# Altium footprint library FootPrintLib_9.PcbLib: 287 footprints (part 16 of 18)
Each footprint in its own frame and in the unit in brackets; x right, y up, seen from the top. Pads: shape width x height; smd on the part's side, far side on the other; paste and mask are expansions set on the pad; w line width, h text height; cw(c..) or ccw(c..) is an arc to the next point about the centre after c.
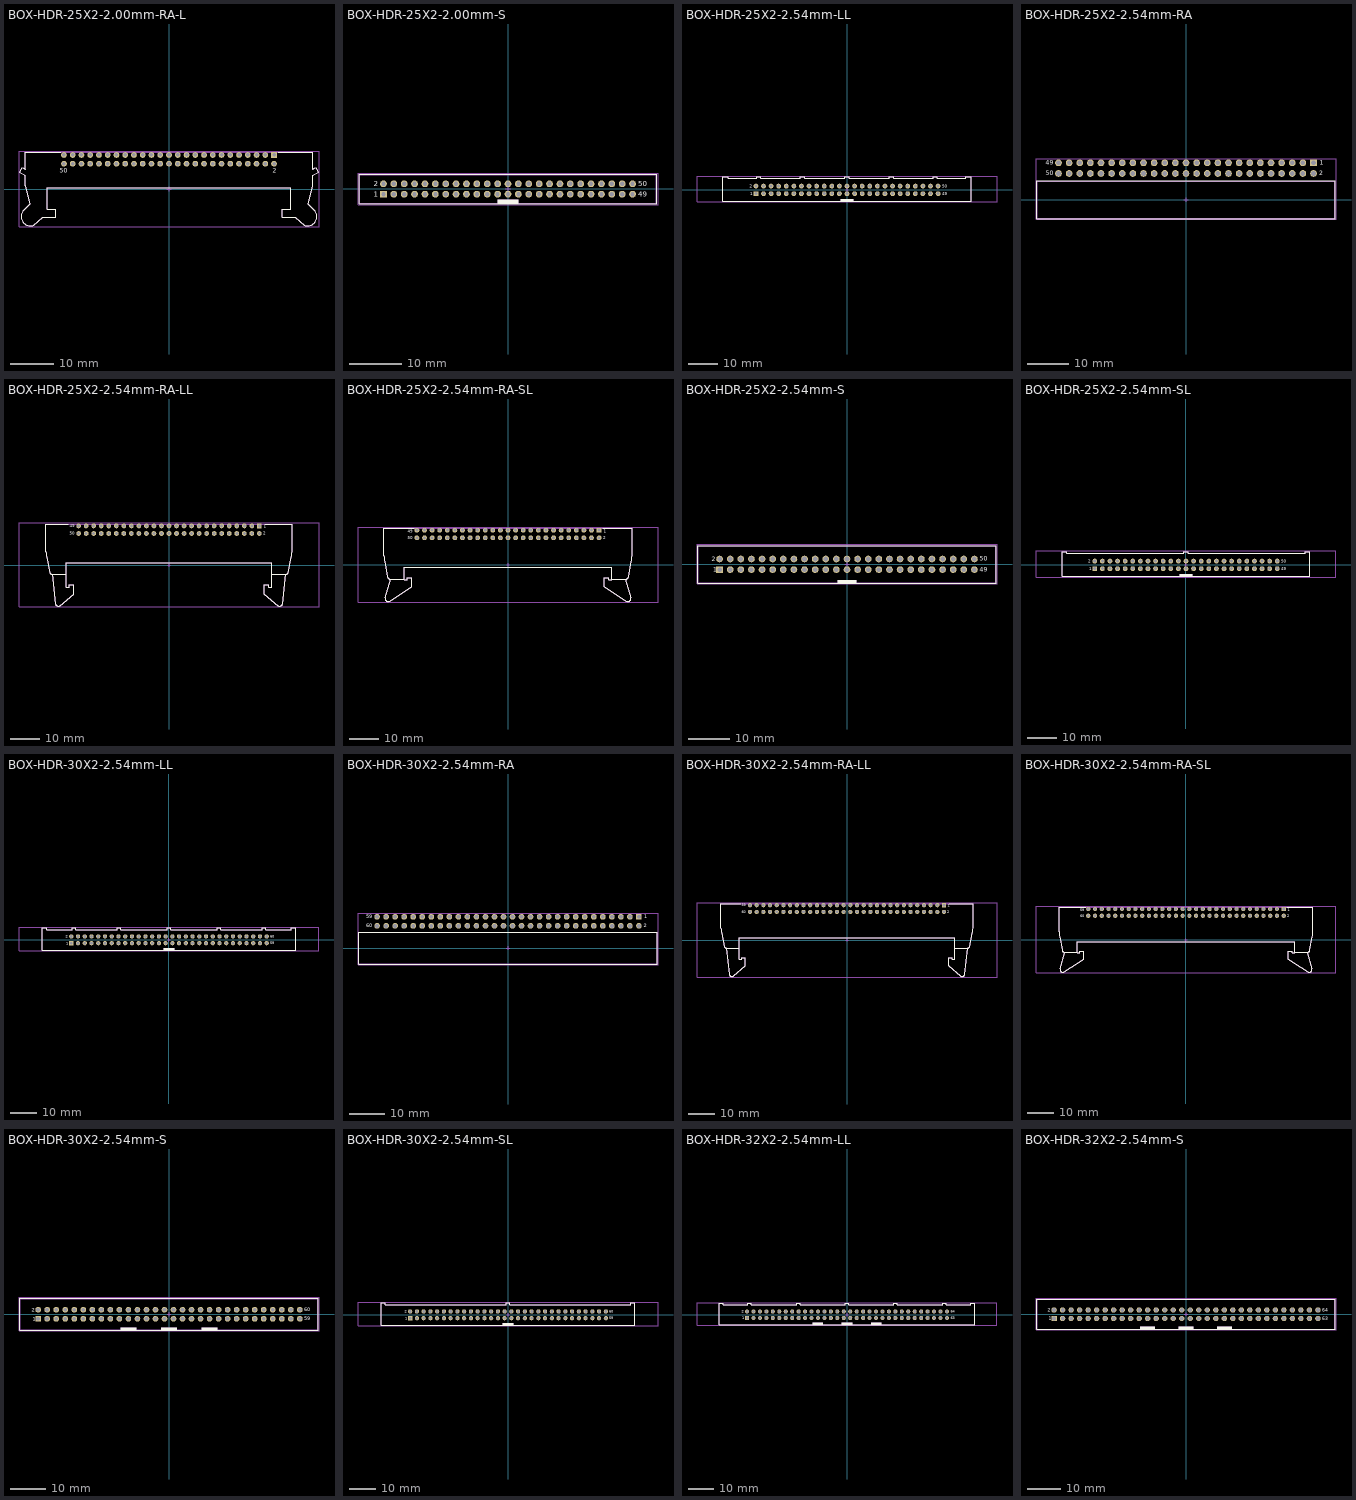
[diagram p15: the footprints below, top view; thin cyan lines are the x and y axes]

## BOX-HDR-25X2-2.00mm-RA-L [mm] "2.00mm Male Angled Box Header with Lever, 50p"
height 3.15
pads (50):
  rect 1.3x1.3 hole 0.8: 1(24,7.775)
  round 1.3 hole 0.8: 2(24,5.775) 3(22,7.775) 4(22,5.775) 5(20,7.775) 6(20,5.775) 7(18,7.775) 8(18,5.775) 9(16,7.775) 10(16,5.775) 11(14,7.775) 12(14,5.775) 13(12,7.775) 14(12,5.775) 15(10,7.775) 16(10,5.775) 17(8,7.775) 18(8,5.775) 19(6,7.775) 20(6,5.775) 21(4,7.775) 22(4,5.775) 23(2,7.775) 24(2,5.775) 25(0,7.775) 26(0,5.775) 27(-2,7.775) 28(-2,5.775) 29(-4,7.775) 30(-4,5.775) 31(-6,7.775) 32(-6,5.775) 33(-8,7.775) 34(-8,5.775) 35(-10,7.775) 36(-10,5.775) 37(-12,7.775) 38(-12,5.775) 39(-14,7.775) 40(-14,5.775) 41(-16,7.775) 42(-16,5.775) 43(-18,7.775) 44(-18,5.775) 45(-20,7.775) 46(-20,5.775) 47(-22,7.775) 48(-22,5.775) 49(-24,7.775) 50(-24,5.775)
Top Overlay:
  lines w0.2: -33.466,4.813 -34.06,3.785 -32.851,3.087 -32.851,0.753 ; -33.46,4.815 -32.848,4.462 ; -32.894,-4.611 ccw(c-31.68,-6.325) -30.865,-8.26 ; -32.892,-4.613 -31.85,-3.535 -32.837,0.738 ; -32.85,4.464 -32.85,8.425 -24.75,8.425 ; -30.866,-8.259 -28.85,-6.475 -25.85,-6.475 -25.85,-4.675 -27.85,-4.675 -27.85,0.325 27.85,0.325 27.85,-4.675 25.85,-4.675 25.85,-6.475 28.85,-6.475 30.866,-8.259 ; 24.95,8.425 32.85,8.425 32.85,4.464 ; 30.865,-8.26 ccw(c31.68,-6.325) 32.894,-4.611 ; 32.837,0.738 31.85,-3.535 32.892,-4.613 ; 32.848,4.462 33.46,4.815 ; 32.851,0.753 32.851,3.087 34.06,3.785 33.466,4.813
  text "50" at -25,3.675 h1.02
  text "2" at 23.7,3.675 h1.02
Mechanical 13:
  lines w0.1: -33.466,4.813 -34.06,3.785 -32.851,3.087 -32.851,0.753 ; -33.46,4.815 -32.848,4.462 ; -32.894,-4.611 ccw(c-31.68,-6.325) -30.865,-8.26 ; -32.892,-4.613 -31.85,-3.535 -32.837,0.738 ; -32.85,4.464 -32.85,8.425 32.85,8.425 ; -30.866,-8.259 -28.85,-6.475 -25.85,-6.475 -25.85,-4.675 -27.85,-4.675 -27.85,0.325 27.85,0.325 27.85,-4.675 25.85,-4.675 25.85,-6.475 28.85,-6.475 30.866,-8.259 ; 30.865,-8.26 ccw(c31.68,-6.325) 32.894,-4.611 ; 32.837,0.738 31.85,-3.535 32.892,-4.613 ; 32.848,4.462 33.46,4.815 ; 32.848,8.423 32.85,8.425 ; 32.85,4.464 32.85,8.425 ; 32.851,0.753 32.851,3.087 34.06,3.785 33.466,4.813
Mechanical 15:
  lines w0.05: -0.5,0 0.5,0 ; 0,-0.5 0,0.5 ; -34.262,-8.625 34.262,-8.625 34.262,8.625 -34.262,8.625 -34.262,-8.625
3D body "62505022121.stp": height 6.1, standoff -3.05, extent -34.062,-8.425 34.062,8.425

## BOX-HDR-25X2-2.00mm-S [mm] "2.00mm Male Box Header, 50p"
height 5.6
pads (50):
  rect 1.3x1.3 hole 0.8: 1(-24,-1)
  round 1.3 hole 0.8: 2(-24,1) 3(-22,-1) 4(-22,1) 5(-20,-1) 6(-20,1) 7(-18,-1) 8(-18,1) 9(-16,-1) 10(-16,1) 11(-14,-1) 12(-14,1) 13(-12,-1) 14(-12,1) 15(-10,-1) 16(-10,1) 17(-8,-1) 18(-8,1) 19(-6,-1) 20(-6,1) 21(-4,-1) 22(-4,1) 23(-2,-1) 24(-2,1) 25(0,-1) 26(0,1) 27(2,-1) 28(2,1) 29(4,-1) 30(4,1) 31(6,-1) 32(6,1) 33(8,-1) 34(8,1) 35(10,-1) 36(10,1) 37(12,-1) 38(12,1) 39(14,-1) 40(14,1) 41(16,-1) 42(16,1) 43(18,-1) 44(18,1) 45(20,-1) 46(20,1) 47(22,-1) 48(22,1) 49(24,-1) 50(24,1)
Top Overlay:
  rectangle: -2,-2.85 2,-2.05
  lines w0.2: -28.7,-2.85 -28.7,2.85 28.7,2.85 28.7,-2.85 -28.7,-2.85
  text "2" at -25.9,0.5 h1.02
  text "1" at -25.9,-1.5 h1.02
  text "49" at 25.1,-1.5 h1.02
  text "50" at 25.1,0.5 h1.02
Mechanical 13:
  rectangle: -2,-2.75 2,-2.05
  lines w0.1: -28.6,-2.75 28.6,-2.75 28.6,2.75 -28.6,2.75 -28.6,-2.75
Mechanical 15:
  lines w0.05: -0.5,0 0.5,0 ; 0,-0.5 0,0.5 ; -28.9,-3.05 28.9,-3.05 28.9,3.05 -28.9,3.05 -28.9,-3.05
3D body "62505021621.stp": height 5.65, standoff -2.45, extent -28.6,-2.75 28.6,2.75

## BOX-HDR-25X2-2.54mm-LL [mm] "50 pins, straight, long lever, gold plating"
height 28
pads (50):
  rect 1.6x1.6 hole 1.02: 1(-30.48,-1.27)
  round 1.6 hole 1.02: 2(-30.48,1.27) 3(-27.94,-1.27) 4(-27.94,1.27) 5(-25.4,-1.27) 6(-25.4,1.27) 7(-22.86,-1.27) 8(-22.86,1.27) 9(-20.32,-1.27) 10(-20.32,1.27) 11(-17.78,-1.27) 12(-17.78,1.27) 13(-15.24,-1.27) 14(-15.24,1.27) 15(-12.7,-1.27) 16(-12.7,1.27) 17(-10.16,-1.27) 18(-10.16,1.27) 19(-7.62,-1.27) 20(-7.62,1.27) 21(-5.08,-1.27) 22(-5.08,1.27) 23(-2.54,-1.27) 24(-2.54,1.27) 25(0,-1.27) 26(0,1.27) 27(2.54,-1.27) 28(2.54,1.27) 29(5.08,-1.27) 30(5.08,1.27) 31(7.62,-1.27) 32(7.62,1.27) 33(10.16,-1.27) 34(10.16,1.27) 35(12.7,-1.27) 36(12.7,1.27) 37(15.24,-1.27) 38(15.24,1.27) 39(17.78,-1.27) 40(17.78,1.27) 41(20.32,-1.27) 42(20.32,1.27) 43(22.86,-1.27) 44(22.86,1.27) 45(25.4,-1.27) 46(25.4,1.27) 47(27.94,-1.27) 48(27.94,1.27) 49(30.48,-1.27) 50(30.48,1.27)
Top Overlay:
  rectangle: -2.1,-3.85 2.1,-3.04
  lines w0.2: -41.5,-3.85 41.5,-3.85 41.5,4.45 39.77,4.45 39.77,3.85 30.2,3.85 30.2,4.45 28.8,4.45 28.8,3.85 15.6,3.85 15.6,4.45 14.2,4.45 14.2,3.85 0.7,3.85 0.7,4.45 -0.7,4.45 -0.7,3.85 -14.2,3.85 -14.2,4.45 -15.6,4.45 -15.6,3.85 -28.8,3.85 -28.8,4.45 -30.2,4.45 -30.2,3.85 -39.77,3.85 -39.77,4.45 -41.5,4.45 -41.5,-3.85
  text "49" at 31.9,-1.74 h1.02
  text "50" at 31.9,0.8 h1.02
  text "2" at -32.5,0.8 h1.02
  text "1" at -32.3,-1.8 h1.02
Mechanical 13:
  rectangle: -2.1,-3.85 2.1,-3.04
  lines w0.1: -41.5,-3.85 -41.5,4.45 -39.77,4.45 -39.77,3.85 -30.2,3.85 -30.2,4.45 -28.8,4.45 -28.8,3.85 -15.6,3.85 -15.6,4.45 -14.2,4.45 -14.2,3.85 -0.7,3.85 -0.7,4.45 0.7,4.45 0.7,3.85 14.2,3.85 14.2,4.45 15.6,4.45 15.6,3.85 28.8,3.85 28.8,4.45 30.2,4.45 30.2,3.85 39.77,3.85 39.77,4.45 41.5,4.45 41.5,-3.85 -41.5,-3.85
Mechanical 15:
  lines w0.05: -0.5,0 0.5,0 ; 0,-0.5 0,0.5 ; -50.2,-4.05 -50.2,4.65 50.2,4.65 50.2,-4.05 -50.2,-4.05
3D body "61205022821 (rev1).stp": height 27.84, standoff -3.35, extent -41.5,-3.86 41.5,4.45

## BOX-HDR-25X2-2.54mm-RA [mm] "50 pins, right angled, gold plating"
height 9.1
pads (50):
  rect 1.6x1.6 hole 1.1: 1(30.48,8.805)
  round 1.6 hole 1.1: 2(30.48,6.265) 3(27.94,8.805) 4(27.94,6.265) 5(25.4,8.805) 6(25.4,6.265) 7(22.86,8.805) 8(22.86,6.265) 9(20.32,8.805) 10(20.32,6.265) 11(17.78,8.805) 12(17.78,6.265) 13(15.24,8.805) 14(15.24,6.265) 15(12.7,8.805) 16(12.7,6.265) 17(10.16,8.805) 18(10.16,6.265) 19(7.62,8.805) 20(7.62,6.265) 21(5.08,8.805) 22(5.08,6.265) 23(2.54,8.805) 24(2.54,6.265) 25(0,8.805) 26(0,6.265) 27(-2.54,8.805) 28(-2.54,6.265) 29(-5.08,8.805) 30(-5.08,6.265) 31(-7.62,8.805) 32(-7.62,6.265) 33(-10.16,8.805) 34(-10.16,6.265) 35(-12.7,8.805) 36(-12.7,6.265) 37(-15.24,8.805) 38(-15.24,6.265) 39(-17.78,8.805) 40(-17.78,6.265) 41(-20.32,8.805) 42(-20.32,6.265) 43(-22.86,8.805) 44(-22.86,6.265) 45(-25.4,8.805) 46(-25.4,6.265) 47(-27.94,8.805) 48(-27.94,6.265) 49(-30.48,8.805) 50(-30.48,6.265)
Top Overlay:
  lines w0.2: -35.655,-4.5 35.655,-4.5 35.655,4.5 -35.655,4.5 -35.655,-4.5
  text "50" at -33.55,5.8 h1.02
  text "49" at -33.55,8.34 h1.02
  text "1" at 31.94,8.34 h1.02
  text "2" at 31.84,5.8 h1.02
Mechanical 13:
  lines w0.1: -35.58,-4.425 35.58,-4.425 35.58,4.425 -35.58,4.425 -35.58,-4.425
Mechanical 15:
  lines w0.05: -0.5,0 0.5,0 ; 0,-0.5 0,0.5 ; -35.855,-4.7 -35.855,9.805 35.855,9.805 35.855,-4.7 -35.855,-4.7
3D body "61205021721.stp": height 9.23, standoff -2.88, extent -35.58,-4.425 35.58,9.125

## BOX-HDR-25X2-2.54mm-RA-LL [mm] "50 pins, right angeled, long lever, gold plating"
height 10.8
pads (50):
  rect 1.6x1.6 hole 1.02: 1(30.48,13.23)
  round 1.6 hole 1.02: 2(30.48,10.69) 3(27.94,13.23) 4(27.94,10.69) 5(25.4,13.23) 6(25.4,10.69) 7(22.86,13.23) 8(22.86,10.69) 9(20.32,13.23) 10(20.32,10.69) 11(17.78,13.23) 12(17.78,10.69) 13(15.24,13.23) 14(15.24,10.69) 15(12.7,13.23) 16(12.7,10.69) 17(10.16,13.23) 18(10.16,10.69) 19(7.62,13.23) 20(7.62,10.69) 21(5.08,13.23) 22(5.08,10.69) 23(2.54,13.23) 24(2.54,10.69) 25(0,13.23) 26(0,10.69) 27(-2.54,13.23) 28(-2.54,10.69) 29(-5.08,13.23) 30(-5.08,10.69) 31(-7.62,13.23) 32(-7.62,10.69) 33(-10.16,13.23) 34(-10.16,10.69) 35(-12.7,13.23) 36(-12.7,10.69) 37(-15.24,13.23) 38(-15.24,10.69) 39(-17.78,13.23) 40(-17.78,10.69) 41(-20.32,13.23) 42(-20.32,10.69) 43(-22.86,13.23) 44(-22.86,10.69) 45(-25.4,13.23) 46(-25.4,10.69) 47(-27.94,13.23) 48(-27.94,10.69) 49(-30.48,13.23) 50(-30.48,10.69)
Top Overlay:
  lines w0.2: -41.5,4.54 -41.5,13.85 -34.05,13.85 ; -41.495,4.54 ccw(c-31.5,4.84) -41.254,2.636 -40.209,-2.534 ; -40.203,-2.533 ccw(c-39.28,-2.15) -39.28,-3.15 -34.6,-3.15 ; -39.464,-3.15 -38.318,-13.022 ccw(c-37.33,-12.87) -36.672,-13.623 -32.201,-9.758 ; -32.2,-9.76 -32.2,-6.66 -33.7,-6.66 -33.7,-7.37 -34.6,-7.37 -34.6,0.85 34.6,0.85 34.6,-7.37 33.7,-7.37 33.7,-6.66 32.2,-6.66 32.2,-9.76 ; 32.201,-9.758 36.673,-13.623 ccw(c37.33,-12.87) 38.318,-13.022 39.464,-3.15 ; 32.45,13.85 41.5,13.85 41.5,4.54 ; 34.6,-3.15 39.28,-3.15 ccw(c39.28,-2.15) 40.204,-2.533 ; 40.209,-2.534 41.254,2.636 ccw(c31.5,4.84) 41.496,4.54
  text "1" at 31.9,12.66 h1.02
  text "2" at 31.8,10.26 h1.02
  text "50" at -33.55,10.26 h1.02
  text "49" at -33.55,12.8 h1.02
Mechanical 13:
  lines w0.1: -41.5,4.54 -41.5,13.85 41.5,13.85 41.5,4.54 ; -41.495,4.54 ccw(c-31.5,4.84) -41.254,2.636 -40.209,-2.534 ; -40.203,-2.533 ccw(c-39.28,-2.15) -39.28,-3.15 -34.6,-3.15 ; -39.464,-3.15 -38.318,-13.022 ccw(c-37.33,-12.87) -36.672,-13.623 -32.201,-9.758 ; -32.2,-9.76 -32.2,-6.66 -33.7,-6.66 -33.7,-7.37 -34.6,-7.37 -34.6,0.85 34.6,0.85 34.6,-7.37 33.7,-7.37 33.7,-6.66 32.2,-6.66 32.2,-9.76 ; 32.201,-9.758 36.673,-13.623 ccw(c37.33,-12.87) 38.318,-13.022 39.464,-3.15 ; 34.6,-3.15 39.28,-3.15 ccw(c39.28,-2.15) 40.204,-2.533 ; 40.209,-2.534 41.254,2.636 ccw(c31.5,4.84) 41.496,4.54
Mechanical 15:
  lines w0.05: -0.5,0 0.5,0 ; 0,-0.5 0,0.5 ; -50.6,-14.06 -50.6,14.23 50.6,14.23 50.6,-14.06 -50.6,-14.06
3D body "61205022921 (rev1).stp": height 8.35, standoff -2.35, extent -41.5,-13.871 41.5,13.85

## BOX-HDR-25X2-2.54mm-RA-SL [mm] "50 pins, right angeled, short lever, gold plating"
height 8.3
pads (50):
  rect 1.6x1.6 hole 1.02: 1(30.48,11.63)
  round 1.6 hole 1.02: 2(30.48,9.09) 3(27.94,11.63) 4(27.94,9.09) 5(25.4,11.63) 6(25.4,9.09) 7(22.86,11.63) 8(22.86,9.09) 9(20.32,11.63) 10(20.32,9.09) 11(17.78,11.63) 12(17.78,9.09) 13(15.24,11.63) 14(15.24,9.09) 15(12.7,11.63) 16(12.7,9.09) 17(10.16,11.63) 18(10.16,9.09) 19(7.62,11.63) 20(7.62,9.09) 21(5.08,11.63) 22(5.08,9.09) 23(2.54,11.63) 24(2.54,9.09) 25(0,11.63) 26(0,9.09) 27(-2.54,11.63) 28(-2.54,9.09) 29(-5.08,11.63) 30(-5.08,9.09) 31(-7.62,11.63) 32(-7.62,9.09) 33(-10.16,11.63) 34(-10.16,9.09) 35(-12.7,11.63) 36(-12.7,9.09) 37(-15.24,11.63) 38(-15.24,9.09) 39(-17.78,11.63) 40(-17.78,9.09) 41(-20.32,11.63) 42(-20.32,9.09) 43(-22.86,11.63) 44(-22.86,9.09) 45(-25.4,11.63) 46(-25.4,9.09) 47(-27.94,11.63) 48(-27.94,9.09) 49(-30.48,11.63) 50(-30.48,9.09)
Top Overlay:
  lines w0.2: -40.364,-3.751 -41.306,1.138 cw(c-31.5,3.1) -41.5,3.1 -41.5,12.25 -31.4,12.25 ; -40.36,-3.75 ccw(c-39.36,-3.75) -39.36,-4.75 ; -39.455,-4.75 -34.7,-4.75 ; -39.274,-4.851 -41.107,-10.941 ccw(c-40.15,-11.23) -39.6,-12.066 -32.2,-7.33 -32.2,-4.23 -33.7,-4.23 -33.7,-4.94 -34.7,-4.94 -34.7,-0.75 34.7,-0.75 34.7,-4.94 33.7,-4.94 33.7,-4.23 32.2,-4.23 32.2,-7.33 39.6,-12.067 ccw(c40.15,-11.23) 41.107,-10.941 39.274,-4.851 ; 31.65,12.25 41.5,12.25 41.5,3.1 cw(c31.5,3.1) 41.306,1.138 40.364,-3.751 ; 34.7,-4.75 39.455,-4.75 ; 39.36,-4.75 ccw(c39.36,-3.75) 40.36,-3.75
  text "49" at -33.55,10.8 h1.02
  text "50" at -33.55,8.6 h1.02
  text "1" at 32,10.8 h1.02
  text "2" at 31.9,8.6 h1.02
Mechanical 13:
  lines w0.1: -40.364,-3.751 -41.306,1.138 cw(c-31.5,3.1) -41.5,3.1 -41.5,12.25 41.5,12.25 41.5,3.1 cw(c31.5,3.1) 41.306,1.138 40.364,-3.751 ; -40.36,-3.75 ccw(c-39.36,-3.75) -39.36,-4.75 ; -39.455,-4.75 -34.7,-4.75 ; -39.274,-4.851 -41.107,-10.941 ccw(c-40.15,-11.23) -39.6,-12.066 -32.2,-7.33 -32.2,-4.23 -33.7,-4.23 -33.7,-4.94 -34.7,-4.94 -34.7,-0.75 34.7,-0.75 34.7,-4.94 33.7,-4.94 33.7,-4.23 32.2,-4.23 32.2,-7.33 39.6,-12.067 ccw(c40.15,-11.23) 41.107,-10.941 39.274,-4.851 ; 34.7,-4.75 39.455,-4.75 ; 39.36,-4.75 ccw(c39.36,-3.75) 40.36,-3.75
Mechanical 15:
  lines w0.05: -0.5,0 0.5,0 ; 0,-0.5 0,0.5 ; -50.2,-12.45 -50.2,12.63 50.2,12.63 50.2,-12.45 -50.2,-12.45
3D body "61205022121.stp": height 8.35, standoff -3.35, extent -41.5,-12.25 41.5,12.25

## BOX-HDR-25X2-2.54mm-S [mm] "50 pins, straight, gold plating"
height 9.1
pads (50):
  rect 1.6x1.6 hole 1.1: 1(-30.48,-1.27)
  round 1.6 hole 1.1: 2(-30.48,1.27) 3(-27.94,-1.27) 4(-27.94,1.27) 5(-25.4,-1.27) 6(-25.4,1.27) 7(-22.86,-1.27) 8(-22.86,1.27) 9(-20.32,-1.27) 10(-20.32,1.27) 11(-17.78,-1.27) 12(-17.78,1.27) 13(-15.24,-1.27) 14(-15.24,1.27) 15(-12.7,-1.27) 16(-12.7,1.27) 17(-10.16,-1.27) 18(-10.16,1.27) 19(-7.62,-1.27) 20(-7.62,1.27) 21(-5.08,-1.27) 22(-5.08,1.27) 23(-2.54,-1.27) 24(-2.54,1.27) 25(0,-1.27) 26(0,1.27) 27(2.54,-1.27) 28(2.54,1.27) 29(5.08,-1.27) 30(5.08,1.27) 31(7.62,-1.27) 32(7.62,1.27) 33(10.16,-1.27) 34(10.16,1.27) 35(12.7,-1.27) 36(12.7,1.27) 37(15.24,-1.27) 38(15.24,1.27) 39(17.78,-1.27) 40(17.78,1.27) 41(20.32,-1.27) 42(20.32,1.27) 43(22.86,-1.27) 44(22.86,1.27) 45(25.4,-1.27) 46(25.4,1.27) 47(27.94,-1.27) 48(27.94,1.27) 49(30.48,-1.27) 50(30.48,1.27)
Top Overlay:
  rectangle: -2.25,-4.5 2.25,-3.7
  lines w0.2: -35.68,-4.5 -35.68,4.5 35.68,4.5 35.68,-4.5 -35.68,-4.5
  text "49" at 31.74,-1.74 h1.02
  text "50" at 31.74,0.8 h1.02
  text "2" at -32.34,0.74 h1.02
  text "1" at -32.04,-1.8 h1.02
Mechanical 13:
  rectangle: -2.25,-4.425 2.25,-3.7
  lines w0.1: -35.58,-4.425 35.58,-4.425 35.58,4.425 -35.58,4.425 -35.58,-4.425
Mechanical 15:
  lines w0.05: -0.5,0 0.5,0 ; 0,-0.5 0,0.5 ; -35.88,-4.7 -35.88,4.85 35.88,4.85 35.88,-4.7 -35.88,-4.7
3D body "61205021621.stp": height 9.13, standoff -2.98, extent -35.58,-4.425 35.58,4.75

## BOX-HDR-25X2-2.54mm-SL [mm] "50 pins, straight, short lever, gold plating"
height 24.5
pads (50):
  rect 1.6x1.6 hole 1.02: 1(-30.48,-1.27)
  round 1.6 hole 1.02: 2(-30.48,1.27) 3(-27.94,-1.27) 4(-27.94,1.27) 5(-25.4,-1.27) 6(-25.4,1.27) 7(-22.86,-1.27) 8(-22.86,1.27) 9(-20.32,-1.27) 10(-20.32,1.27) 11(-17.78,-1.27) 12(-17.78,1.27) 13(-15.24,-1.27) 14(-15.24,1.27) 15(-12.7,-1.27) 16(-12.7,1.27) 17(-10.16,-1.27) 18(-10.16,1.27) 19(-7.62,-1.27) 20(-7.62,1.27) 21(-5.08,-1.27) 22(-5.08,1.27) 23(-2.54,-1.27) 24(-2.54,1.27) 25(0,-1.27) 26(0,1.27) 27(2.54,-1.27) 28(2.54,1.27) 29(5.08,-1.27) 30(5.08,1.27) 31(7.62,-1.27) 32(7.62,1.27) 33(10.16,-1.27) 34(10.16,1.27) 35(12.7,-1.27) 36(12.7,1.27) 37(15.24,-1.27) 38(15.24,1.27) 39(17.78,-1.27) 40(17.78,1.27) 41(20.32,-1.27) 42(20.32,1.27) 43(22.86,-1.27) 44(22.86,1.27) 45(25.4,-1.27) 46(25.4,1.27) 47(27.94,-1.27) 48(27.94,1.27) 49(30.48,-1.27) 50(30.48,1.27)
Top Overlay:
  rectangle: -2.1,-3.85 2.1,-3.05
  lines w0.2: -0.7,4.45 -0.7,3.85 -39.85,3.85 -39.85,4.45 -41.4,4.45 -41.4,-3.85 41.4,-3.85 41.4,4.45 39.85,4.45 39.85,3.85 0.7,3.85 0.7,4.45 -0.7,4.45 ; -0.7,4.45 -0.7,4.45
  text "1" at -32.3,-1.8 h1.02
  text "2" at -32.6,0.8 h1.02
  text "49" at 31.8,-1.74 h1.02
  text "50" at 31.8,0.8 h1.02
Mechanical 13:
  rectangle: -2.1,-3.85 2.1,-3.05
  lines w0.1: -0.7,4.45 0.7,4.45 0.7,3.85 39.85,3.85 39.85,4.45 41.4,4.45 41.4,-3.85 -41.4,-3.85 -41.4,4.45 -39.85,4.45 -39.85,3.85 -0.7,3.85 -0.7,4.45 ; -0.7,4.45 -0.7,4.45
Mechanical 15:
  lines w0.05: -0.5,0 0.5,0 ; 0,-0.5 0,0.5 ; -50.1,-4.05 50.1,-4.05 50.1,4.65 -50.1,4.65 -50.1,-4.05
3D body "61205022021.stp": height 24.55, standoff -3.35, extent -41.5,-3.85 41.5,4.45

## BOX-HDR-30X2-2.54mm-LL [mm] "60 pins, straight, long lever, gold plating"
height 28
pads (60):
  rect 1.6x1.6 hole 1.02: 1(-36.83,-1.27)
  round 1.6 hole 1.02: 2(-36.83,1.27) 3(-34.29,-1.27) 4(-34.29,1.27) 5(-31.75,-1.27) 6(-31.75,1.27) 7(-29.21,-1.27) 8(-29.21,1.27) 9(-26.67,-1.27) 10(-26.67,1.27) 11(-24.13,-1.27) 12(-24.13,1.27) 13(-21.59,-1.27) 14(-21.59,1.27) 15(-19.05,-1.27) 16(-19.05,1.27) 17(-16.51,-1.27) 18(-16.51,1.27) 19(-13.97,-1.27) 20(-13.97,1.27) 21(-11.43,-1.27) 22(-11.43,1.27) 23(-8.89,-1.27) 24(-8.89,1.27) 25(-6.35,-1.27) 26(-6.35,1.27) 27(-3.81,-1.27) 28(-3.81,1.27) 29(-1.27,-1.27) 30(-1.27,1.27) 31(1.27,-1.27) 32(1.27,1.27) 33(3.81,-1.27) 34(3.81,1.27) 35(6.35,-1.27) 36(6.35,1.27) 37(8.89,-1.27) 38(8.89,1.27) 39(11.43,-1.27) 40(11.43,1.27) 41(13.97,-1.27) 42(13.97,1.27) 43(16.51,-1.27) 44(16.51,1.27) 45(19.05,-1.27) 46(19.05,1.27) 47(21.59,-1.27) 48(21.59,1.27) 49(24.13,-1.27) 50(24.13,1.27) 51(26.67,-1.27) 52(26.67,1.27) 53(29.21,-1.27) 54(29.21,1.27) 55(31.75,-1.27) 56(31.75,1.27) 57(34.29,-1.27) 58(34.29,1.27) 59(36.83,-1.27) 60(36.83,1.27)
Top Overlay:
  rectangle: -2.1,-3.85 2.1,-3.04
  lines w0.2: -47.85,-3.85 47.85,-3.85 47.85,4.45 46.12,4.45 46.12,3.85 36.55,3.85 36.55,4.45 35.15,4.45 35.15,3.85 19.5,3.85 19.5,4.45 18.1,4.45 18.1,3.85 0.7,3.85 0.7,4.45 -0.7,4.45 -0.7,3.85 -18.1,3.85 -18.1,4.45 -19.5,4.45 -19.5,3.85 -35.15,3.85 -35.15,4.45 -36.55,4.45 -36.55,3.85 -46.12,3.85 -46.12,4.45 -47.85,4.45 -47.85,-3.85
  text "2" at -38.85,0.8 h1.02
  text "1" at -38.65,-1.8 h1.02
  text "60" at 38.25,0.8 h1.02
  text "59" at 38.25,-1.74 h1.02
Mechanical 13:
  rectangle: -2.1,-3.85 2.1,-3.04
  lines w0.1: -47.85,-3.85 -47.85,4.45 -46.12,4.45 -46.12,3.85 -36.55,3.85 -36.55,4.45 -35.15,4.45 -35.15,3.85 -19.5,3.85 -19.5,4.45 -18.1,4.45 -18.1,3.85 -0.7,3.85 -0.7,4.45 0.7,4.45 0.7,3.85 18.1,3.85 18.1,4.45 19.5,4.45 19.5,3.85 35.15,3.85 35.15,4.45 36.55,4.45 36.55,3.85 46.12,3.85 46.12,4.45 47.85,4.45 47.85,-3.85 -47.85,-3.85
Mechanical 15:
  lines w0.05: -0.5,0 0.5,0 ; 0,-0.5 0,0.5 ; -56.55,-4.05 -56.55,4.65 56.55,4.65 56.55,-4.05 -56.55,-4.05
3D body "61206022821 (rev1).stp": height 27.84, standoff -3.35, extent -47.85,-3.86 47.85,4.45

## BOX-HDR-30X2-2.54mm-RA [mm] "60 pins, right angled, gold plating"
height 9.1
pads (60):
  rect 1.6x1.6 hole 1.1: 1(36.83,8.805)
  round 1.6 hole 1.1: 2(36.83,6.265) 3(34.29,8.805) 4(34.29,6.265) 5(31.75,8.805) 6(31.75,6.265) 7(29.21,8.805) 8(29.21,6.265) 9(26.67,8.805) 10(26.67,6.265) 11(24.13,8.805) 12(24.13,6.265) 13(21.59,8.805) 14(21.59,6.265) 15(19.05,8.805) 16(19.05,6.265) 17(16.51,8.805) 18(16.51,6.265) 19(13.97,8.805) 20(13.97,6.265) 21(11.43,8.805) 22(11.43,6.265) 23(8.89,8.805) 24(8.89,6.265) 25(6.35,8.805) 26(6.35,6.265) 27(3.81,8.805) 28(3.81,6.265) 29(1.27,8.805) 30(1.27,6.265) 31(-1.27,8.805) 32(-1.27,6.265) 33(-3.81,8.805) 34(-3.81,6.265) 35(-6.35,8.805) 36(-6.35,6.265) 37(-8.89,8.805) 38(-8.89,6.265) 39(-11.43,8.805) 40(-11.43,6.265) 41(-13.97,8.805) 42(-13.97,6.265) 43(-16.51,8.805) 44(-16.51,6.265) 45(-19.05,8.805) 46(-19.05,6.265) 47(-21.59,8.805) 48(-21.59,6.265) 49(-24.13,8.805) 50(-24.13,6.265) 51(-26.67,8.805) 52(-26.67,6.265) 53(-29.21,8.805) 54(-29.21,6.265) 55(-31.75,8.805) 56(-31.75,6.265) 57(-34.29,8.805) 58(-34.29,6.265) 59(-36.83,8.805) 60(-36.83,6.265)
Top Overlay:
  lines w0.2: -42.005,-4.5 42.005,-4.5 42.005,4.5 -42.005,4.5 -42.005,-4.5
  text "1" at 38.29,8.34 h1.02
  text "2" at 38.19,5.8 h1.02
  text "59" at -39.9,8.34 h1.02
  text "60" at -39.9,5.8 h1.02
Mechanical 13:
  lines w0.1: -41.93,-4.425 41.93,-4.425 41.93,4.425 -41.93,4.425 -41.93,-4.425
Mechanical 15:
  lines w0.05: -0.5,0 0.5,0 ; 0,-0.5 0,0.5 ; -42.205,-4.7 -42.205,9.805 42.205,9.805 42.205,-4.7 -42.205,-4.7
3D body "61206021721.stp": height 9.23, standoff -2.88, extent -41.93,-4.425 41.93,9.125

## BOX-HDR-30X2-2.54mm-RA-LL [mm] "60 pins, right angeled, long lever, gold plating"
height 10.8
pads (60):
  rect 1.6x1.6 hole 1.02: 1(36.83,13.23)
  round 1.6 hole 1.02: 2(36.83,10.69) 3(34.29,13.23) 4(34.29,10.69) 5(31.75,13.23) 6(31.75,10.69) 7(29.21,13.23) 8(29.21,10.69) 9(26.67,13.23) 10(26.67,10.69) 11(24.13,13.23) 12(24.13,10.69) 13(21.59,13.23) 14(21.59,10.69) 15(19.05,13.23) 16(19.05,10.69) 17(16.51,13.23) 18(16.51,10.69) 19(13.97,13.23) 20(13.97,10.69) 21(11.43,13.23) 22(11.43,10.69) 23(8.89,13.23) 24(8.89,10.69) 25(6.35,13.23) 26(6.35,10.69) 27(3.81,13.23) 28(3.81,10.69) 29(1.27,13.23) 30(1.27,10.69) 31(-1.27,13.23) 32(-1.27,10.69) 33(-3.81,13.23) 34(-3.81,10.69) 35(-6.35,13.23) 36(-6.35,10.69) 37(-8.89,13.23) 38(-8.89,10.69) 39(-11.43,13.23) 40(-11.43,10.69) 41(-13.97,13.23) 42(-13.97,10.69) 43(-16.51,13.23) 44(-16.51,10.69) 45(-19.05,13.23) 46(-19.05,10.69) 47(-21.59,13.23) 48(-21.59,10.69) 49(-24.13,13.23) 50(-24.13,10.69) 51(-26.67,13.23) 52(-26.67,10.69) 53(-29.21,13.23) 54(-29.21,10.69) 55(-31.75,13.23) 56(-31.75,10.69) 57(-34.29,13.23) 58(-34.29,10.69) 59(-36.83,13.23) 60(-36.83,10.69)
Top Overlay:
  lines w0.2: -47.85,4.54 -47.85,13.85 -40.4,13.85 ; -47.845,4.54 ccw(c-37.85,4.84) -47.604,2.636 -46.559,-2.534 ; -46.553,-2.533 ccw(c-45.63,-2.15) -45.63,-3.15 -40.95,-3.15 ; -45.814,-3.15 -44.668,-13.022 ccw(c-43.68,-12.87) -43.022,-13.623 -38.551,-9.758 ; -38.55,-9.76 -38.55,-6.66 -40.05,-6.66 -40.05,-7.37 -40.95,-7.37 -40.95,0.85 40.95,0.85 40.95,-7.37 40.05,-7.37 40.05,-6.66 38.55,-6.66 38.55,-9.76 ; 38.551,-9.758 43.023,-13.623 ccw(c43.68,-12.87) 44.668,-13.022 45.814,-3.15 ; 38.8,13.85 47.85,13.85 47.85,4.54 ; 40.95,-3.15 45.63,-3.15 ccw(c45.63,-2.15) 46.554,-2.533 ; 46.559,-2.534 47.604,2.636 ccw(c37.85,4.84) 47.846,4.54
  text "60" at -39.9,10.26 h1.02
  text "59" at -39.9,12.8 h1.02
  text "2" at 38.15,10.26 h1.02
  text "1" at 38.25,12.66 h1.02
Mechanical 13:
  lines w0.1: -47.85,4.54 -47.85,13.85 47.85,13.85 47.85,4.54 ; -47.845,4.54 ccw(c-37.85,4.84) -47.604,2.636 -46.559,-2.534 ; -46.553,-2.533 ccw(c-45.63,-2.15) -45.63,-3.15 -40.95,-3.15 ; -45.814,-3.15 -44.668,-13.022 ccw(c-43.68,-12.87) -43.022,-13.623 -38.551,-9.758 ; -38.55,-9.76 -38.55,-6.66 -40.05,-6.66 -40.05,-7.37 -40.95,-7.37 -40.95,0.85 40.95,0.85 40.95,-7.37 40.05,-7.37 40.05,-6.66 38.55,-6.66 38.55,-9.76 ; 38.551,-9.758 43.023,-13.623 ccw(c43.68,-12.87) 44.668,-13.022 45.814,-3.15 ; 40.95,-3.15 45.63,-3.15 ccw(c45.63,-2.15) 46.554,-2.533 ; 46.559,-2.534 47.604,2.636 ccw(c37.85,4.84) 47.846,4.54
Mechanical 15:
  lines w0.05: -0.5,0 0.5,0 ; 0,-0.5 0,0.5 ; -56.95,-14.06 56.95,-14.06 56.95,14.23 -56.95,14.23 -56.95,-14.06
3D body "61206022921 (rev1).stp": height 8.35, standoff -2.35, extent -47.85,-13.871 47.85,13.85

## BOX-HDR-30X2-2.54mm-RA-SL [mm] "60 pins, right angeled, short lever, gold plating"
height 8.3
pads (60):
  rect 1.6x1.6 hole 1.02: 1(36.83,11.63)
  round 1.6 hole 1.02: 2(36.83,9.09) 3(34.29,11.63) 4(34.29,9.09) 5(31.75,11.63) 6(31.75,9.09) 7(29.21,11.63) 8(29.21,9.09) 9(26.67,11.63) 10(26.67,9.09) 11(24.13,11.63) 12(24.13,9.09) 13(21.59,11.63) 14(21.59,9.09) 15(19.05,11.63) 16(19.05,9.09) 17(16.51,11.63) 18(16.51,9.09) 19(13.97,11.63) 20(13.97,9.09) 21(11.43,11.63) 22(11.43,9.09) 23(8.89,11.63) 24(8.89,9.09) 25(6.35,11.63) 26(6.35,9.09) 27(3.81,11.63) 28(3.81,9.09) 29(1.27,11.63) 30(1.27,9.09) 31(-1.27,11.63) 32(-1.27,9.09) 33(-3.81,11.63) 34(-3.81,9.09) 35(-6.35,11.63) 36(-6.35,9.09) 37(-8.89,11.63) 38(-8.89,9.09) 39(-11.43,11.63) 40(-11.43,9.09) 41(-13.97,11.63) 42(-13.97,9.09) 43(-16.51,11.63) 44(-16.51,9.09) 45(-19.05,11.63) 46(-19.05,9.09) 47(-21.59,11.63) 48(-21.59,9.09) 49(-24.13,11.63) 50(-24.13,9.09) 51(-26.67,11.63) 52(-26.67,9.09) 53(-29.21,11.63) 54(-29.21,9.09) 55(-31.75,11.63) 56(-31.75,9.09) 57(-34.29,11.63) 58(-34.29,9.09) 59(-36.83,11.63) 60(-36.83,9.09)
Top Overlay:
  lines w0.2: -46.714,-3.751 -47.656,1.138 cw(c-37.85,3.1) -47.85,3.1 -47.85,12.25 -37.75,12.25 ; -46.71,-3.75 ccw(c-45.71,-3.75) -45.71,-4.75 ; -45.805,-4.75 -41.05,-4.75 ; -45.624,-4.851 -47.457,-10.941 ccw(c-46.5,-11.23) -45.95,-12.066 -38.55,-7.33 -38.55,-4.23 -40.05,-4.23 -40.05,-4.94 -41.05,-4.94 -41.05,-0.75 41.05,-0.75 41.05,-4.94 40.05,-4.94 40.05,-4.23 38.55,-4.23 38.55,-7.33 45.95,-12.067 ccw(c46.5,-11.23) 47.457,-10.941 45.624,-4.851 ; 38,12.25 47.85,12.25 47.85,3.1 cw(c37.85,3.1) 47.656,1.138 46.714,-3.751 ; 41.05,-4.75 45.805,-4.75 ; 45.71,-4.75 ccw(c45.71,-3.75) 46.71,-3.75
  text "2" at 38.25,8.6 h1.02
  text "1" at 38.35,10.8 h1.02
  text "59" at -39.9,10.8 h1.02
  text "60" at -39.9,8.6 h1.02
Mechanical 13:
  lines w0.1: -46.714,-3.751 -47.656,1.138 cw(c-37.85,3.1) -47.85,3.1 -47.85,12.25 47.85,12.25 47.85,3.1 cw(c37.85,3.1) 47.656,1.138 46.714,-3.751 ; -46.71,-3.75 ccw(c-45.71,-3.75) -45.71,-4.75 ; -45.805,-4.75 -41.05,-4.75 ; -45.624,-4.851 -47.457,-10.941 ccw(c-46.5,-11.23) -45.95,-12.066 -38.55,-7.33 -38.55,-4.23 -40.05,-4.23 -40.05,-4.94 -41.05,-4.94 -41.05,-0.75 41.05,-0.75 41.05,-4.94 40.05,-4.94 40.05,-4.23 38.55,-4.23 38.55,-7.33 45.95,-12.067 ccw(c46.5,-11.23) 47.457,-10.941 45.624,-4.851 ; 41.05,-4.75 45.805,-4.75 ; 45.71,-4.75 ccw(c45.71,-3.75) 46.71,-3.75
Mechanical 15:
  lines w0.05: -0.5,0 0.5,0 ; 0,-0.5 0,0.5 ; -56.55,-12.45 56.55,-12.45 56.55,12.63 -56.55,12.63 -56.55,-12.45
3D body "61206022121.stp": height 8.35, standoff -3.35, extent -47.85,-12.25 47.85,12.25

## BOX-HDR-30X2-2.54mm-S [mm] "60 pins, straight, gold plating"
height 9.1
pads (60):
  rect 1.6x1.6 hole 1.1: 1(-36.83,-1.27)
  round 1.6 hole 1.1: 2(-36.83,1.27) 3(-34.29,-1.27) 4(-34.29,1.27) 5(-31.75,-1.27) 6(-31.75,1.27) 7(-29.21,-1.27) 8(-29.21,1.27) 9(-26.67,-1.27) 10(-26.67,1.27) 11(-24.13,-1.27) 12(-24.13,1.27) 13(-21.59,-1.27) 14(-21.59,1.27) 15(-19.05,-1.27) 16(-19.05,1.27) 17(-16.51,-1.27) 18(-16.51,1.27) 19(-13.97,-1.27) 20(-13.97,1.27) 21(-11.43,-1.27) 22(-11.43,1.27) 23(-8.89,-1.27) 24(-8.89,1.27) 25(-6.35,-1.27) 26(-6.35,1.27) 27(-3.81,-1.27) 28(-3.81,1.27) 29(-1.27,-1.27) 30(-1.27,1.27) 31(1.27,-1.27) 32(1.27,1.27) 33(3.81,-1.27) 34(3.81,1.27) 35(6.35,-1.27) 36(6.35,1.27) 37(8.89,-1.27) 38(8.89,1.27) 39(11.43,-1.27) 40(11.43,1.27) 41(13.97,-1.27) 42(13.97,1.27) 43(16.51,-1.27) 44(16.51,1.27) 45(19.05,-1.27) 46(19.05,1.27) 47(21.59,-1.27) 48(21.59,1.27) 49(24.13,-1.27) 50(24.13,1.27) 51(26.67,-1.27) 52(26.67,1.27) 53(29.21,-1.27) 54(29.21,1.27) 55(31.75,-1.27) 56(31.75,1.27) 57(34.29,-1.27) 58(34.29,1.27) 59(36.83,-1.27) 60(36.83,1.27)
Top Overlay:
  rectangle: 9.18,-4.5 13.68,-3.7
  rectangle: -13.68,-4.5 -9.18,-3.7
  rectangle: -2.25,-4.5 2.25,-3.7
  lines w0.2: -42.03,-4.5 42.03,-4.5 42.03,4.5 -42.03,4.5 -42.03,-4.5
  text "59" at 38.09,-1.74 h1.02
  text "60" at 38.09,0.8 h1.02
  text "1" at -38.39,-1.8 h1.02
  text "2" at -38.69,0.74 h1.02
Mechanical 13:
  rectangle: 9.18,-4.425 13.68,-3.7
  rectangle: -13.68,-4.425 -9.18,-3.7
  rectangle: -2.25,-4.425 2.25,-3.7
  lines w0.1: -41.93,-4.425 -41.93,4.425 41.93,4.425 41.93,-4.425 -41.93,-4.425
Mechanical 15:
  lines w0.05: -0.5,0 0.5,0 ; 0,-0.5 0,0.5 ; -42.23,-4.7 42.23,-4.7 42.23,4.85 -42.23,4.85 -42.23,-4.7
3D body "61206021621.stp": height 9.13, standoff -2.98, extent -41.93,-4.425 41.93,4.75

## BOX-HDR-30X2-2.54mm-SL [mm] "60 pins, straight, short lever, gold plating"
height 24.5
pads (60):
  rect 1.6x1.6 hole 1.02: 1(-36.83,-1.27)
  round 1.6 hole 1.02: 2(-36.83,1.27) 3(-34.29,-1.27) 4(-34.29,1.27) 5(-31.75,-1.27) 6(-31.75,1.27) 7(-29.21,-1.27) 8(-29.21,1.27) 9(-26.67,-1.27) 10(-26.67,1.27) 11(-24.13,-1.27) 12(-24.13,1.27) 13(-21.59,-1.27) 14(-21.59,1.27) 15(-19.05,-1.27) 16(-19.05,1.27) 17(-16.51,-1.27) 18(-16.51,1.27) 19(-13.97,-1.27) 20(-13.97,1.27) 21(-11.43,-1.27) 22(-11.43,1.27) 23(-8.89,-1.27) 24(-8.89,1.27) 25(-6.35,-1.27) 26(-6.35,1.27) 27(-3.81,-1.27) 28(-3.81,1.27) 29(-1.27,-1.27) 30(-1.27,1.27) 31(1.27,-1.27) 32(1.27,1.27) 33(3.81,-1.27) 34(3.81,1.27) 35(6.35,-1.27) 36(6.35,1.27) 37(8.89,-1.27) 38(8.89,1.27) 39(11.43,-1.27) 40(11.43,1.27) 41(13.97,-1.27) 42(13.97,1.27) 43(16.51,-1.27) 44(16.51,1.27) 45(19.05,-1.27) 46(19.05,1.27) 47(21.59,-1.27) 48(21.59,1.27) 49(24.13,-1.27) 50(24.13,1.27) 51(26.67,-1.27) 52(26.67,1.27) 53(29.21,-1.27) 54(29.21,1.27) 55(31.75,-1.27) 56(31.75,1.27) 57(34.29,-1.27) 58(34.29,1.27) 59(36.83,-1.27) 60(36.83,1.27)
Top Overlay:
  rectangle: -2.1,-3.85 2.1,-3.05
  lines w0.2: -0.7,4.45 0.7,4.45 0.7,3.85 46.2,3.85 46.2,4.45 47.75,4.45 47.75,-3.85 -47.75,-3.85 -47.75,4.45 -46.2,4.45 -46.2,3.85 -0.7,3.85 -0.7,4.45 ; -0.7,4.45 -0.7,4.45
  text "2" at -38.95,0.8 h1.02
  text "1" at -38.65,-1.8 h1.02
  text "59" at 38.15,-1.74 h1.02
  text "60" at 38.15,0.8 h1.02
Mechanical 13:
  rectangle: -2.1,-3.85 2.1,-3.05
  lines w0.1: -0.7,4.45 -0.7,3.85 -46.2,3.85 -46.2,4.45 -47.75,4.45 -47.75,-3.85 47.75,-3.85 47.75,4.45 46.2,4.45 46.2,3.85 0.7,3.85 0.7,4.45 -0.7,4.45 ; -0.7,4.45 -0.7,4.45
Mechanical 15:
  lines w0.05: -0.5,0 0.5,0 ; 0,-0.5 0,0.5 ; -56.45,-4.05 -56.45,4.65 56.45,4.65 56.45,-4.05 -56.45,-4.05
3D body "61206022021.stp": height 24.55, standoff -3.35, extent -47.849,-3.85 47.851,4.45

## BOX-HDR-32X2-2.54mm-LL [mm] "64 pins, straight, long lever, gold plating"
height 28
pads (64):
  rect 1.6x1.6 hole 1.02: 1(-39.37,-1.27)
  round 1.6 hole 1.02: 2(-39.37,1.27) 3(-36.83,-1.27) 4(-36.83,1.27) 5(-34.29,-1.27) 6(-34.29,1.27) 7(-31.75,-1.27) 8(-31.75,1.27) 9(-29.21,-1.27) 10(-29.21,1.27) 11(-26.67,-1.27) 12(-26.67,1.27) 13(-24.13,-1.27) 14(-24.13,1.27) 15(-21.59,-1.27) 16(-21.59,1.27) 17(-19.05,-1.27) 18(-19.05,1.27) 19(-16.51,-1.27) 20(-16.51,1.27) 21(-13.97,-1.27) 22(-13.97,1.27) 23(-11.43,-1.27) 24(-11.43,1.27) 25(-8.89,-1.27) 26(-8.89,1.27) 27(-6.35,-1.27) 28(-6.35,1.27) 29(-3.81,-1.27) 30(-3.81,1.27) 31(-1.27,-1.27) 32(-1.27,1.27) 33(1.27,-1.27) 34(1.27,1.27) 35(3.81,-1.27) 36(3.81,1.27) 37(6.35,-1.27) 38(6.35,1.27) 39(8.89,-1.27) 40(8.89,1.27) 41(11.43,-1.27) 42(11.43,1.27) 43(13.97,-1.27) 44(13.97,1.27) 45(16.51,-1.27) 46(16.51,1.27) 47(19.05,-1.27) 48(19.05,1.27) 49(21.59,-1.27) 50(21.59,1.27) 51(24.13,-1.27) 52(24.13,1.27) 53(26.67,-1.27) 54(26.67,1.27) 55(29.21,-1.27) 56(29.21,1.27) 57(31.75,-1.27) 58(31.75,1.27) 59(34.29,-1.27) 60(34.29,1.27) 61(36.83,-1.27) 62(36.83,1.27) 63(39.37,-1.27) 64(39.37,1.27)
Top Overlay:
  rectangle: -2.1,-3.85 2.1,-3.04
  rectangle: -13.56,-3.85 -9.36,-3.04
  rectangle: 9.36,-3.85 13.56,-3.04
  lines w0.2: -50.39,-3.85 50.39,-3.85 50.39,4.45 48.66,4.45 48.66,3.85 39.09,3.85 39.09,4.45 37.69,4.45 37.69,3.85 19.8,3.85 19.8,4.45 18.4,4.45 18.4,3.85 0.7,3.85 0.7,4.45 -0.7,4.45 -0.7,3.85 -18.4,3.85 -18.4,4.45 -19.8,4.45 -19.8,3.85 -37.69,3.85 -37.69,4.45 -39.09,4.45 -39.09,3.85 -48.66,3.85 -48.66,4.45 -50.39,4.45 -50.39,-3.85
  text "63" at 40.79,-1.74 h1.02
  text "64" at 40.79,0.8 h1.02
  text "2" at -41.39,0.8 h1.02
  text "1" at -41.19,-1.8 h1.02
Mechanical 13:
  rectangle: 9.36,-3.85 13.56,-3.04
  rectangle: -13.56,-3.85 -9.36,-3.04
  rectangle: -2.1,-3.85 2.1,-3.04
  lines w0.1: -50.39,-3.85 -50.39,4.45 -48.66,4.45 -48.66,3.85 -39.09,3.85 -39.09,4.45 -37.69,4.45 -37.69,3.85 -19.8,3.85 -19.8,4.45 -18.4,4.45 -18.4,3.85 -0.7,3.85 -0.7,4.45 0.7,4.45 0.7,3.85 18.4,3.85 18.4,4.45 19.8,4.45 19.8,3.85 37.69,3.85 37.69,4.45 39.09,4.45 39.09,3.85 48.66,3.85 48.66,4.45 50.39,4.45 50.39,-3.85 -50.39,-3.85
Mechanical 15:
  lines w0.05: -0.5,0 0.5,0 ; 0,-0.5 0,0.5 ; -59.09,-4.05 -59.09,4.65 59.09,4.65 59.09,-4.05 -59.09,-4.05
3D body "61206422821 (rev1).stp": height 27.84, standoff -3.35, extent -50.39,-3.86 50.39,4.45

## BOX-HDR-32X2-2.54mm-S [mm] "64 pins, straight, gold plating"
height 9.1
pads (64):
  rect 1.6x1.6 hole 1.1: 1(-39.37,-1.27)
  round 1.6 hole 1.1: 2(-39.37,1.27) 3(-36.83,-1.27) 4(-36.83,1.27) 5(-34.29,-1.27) 6(-34.29,1.27) 7(-31.75,-1.27) 8(-31.75,1.27) 9(-29.21,-1.27) 10(-29.21,1.27) 11(-26.67,-1.27) 12(-26.67,1.27) 13(-24.13,-1.27) 14(-24.13,1.27) 15(-21.59,-1.27) 16(-21.59,1.27) 17(-19.05,-1.27) 18(-19.05,1.27) 19(-16.51,-1.27) 20(-16.51,1.27) 21(-13.97,-1.27) 22(-13.97,1.27) 23(-11.43,-1.27) 24(-11.43,1.27) 25(-8.89,-1.27) 26(-8.89,1.27) 27(-6.35,-1.27) 28(-6.35,1.27) 29(-3.81,-1.27) 30(-3.81,1.27) 31(-1.27,-1.27) 32(-1.27,1.27) 33(1.27,-1.27) 34(1.27,1.27) 35(3.81,-1.27) 36(3.81,1.27) 37(6.35,-1.27) 38(6.35,1.27) 39(8.89,-1.27) 40(8.89,1.27) 41(11.43,-1.27) 42(11.43,1.27) 43(13.97,-1.27) 44(13.97,1.27) 45(16.51,-1.27) 46(16.51,1.27) 47(19.05,-1.27) 48(19.05,1.27) 49(21.59,-1.27) 50(21.59,1.27) 51(24.13,-1.27) 52(24.13,1.27) 53(26.67,-1.27) 54(26.67,1.27) 55(29.21,-1.27) 56(29.21,1.27) 57(31.75,-1.27) 58(31.75,1.27) 59(34.29,-1.27) 60(34.29,1.27) 61(36.83,-1.27) 62(36.83,1.27) 63(39.37,-1.27) 64(39.37,1.27)
Top Overlay:
  rectangle: -2.25,-4.5 2.25,-3.7
  rectangle: -13.68,-4.5 -9.18,-3.7
  rectangle: 9.18,-4.5 13.68,-3.7
  lines w0.2: -44.57,-4.5 44.57,-4.5 44.57,4.5 -44.57,4.5 -44.57,-4.5
  text "64" at 40.63,0.8 h1.02
  text "63" at 40.63,-1.74 h1.02
  text "1" at -40.93,-1.8 h1.02
  text "2" at -41.23,0.74 h1.02
Mechanical 13:
  rectangle: -2.25,-4.425 2.25,-3.7
  rectangle: -13.68,-4.425 -9.18,-3.7
  rectangle: 9.18,-4.425 13.68,-3.7
  lines w0.1: -44.47,-4.425 -44.47,4.425 44.47,4.425 44.47,-4.425 -44.47,-4.425
Mechanical 15:
  lines w0.05: -0.5,0 0.5,0 ; 0,-0.5 0,0.5 ; -44.77,-4.7 44.77,-4.7 44.77,4.85 -44.77,4.85 -44.77,-4.7
3D body "61206421621.stp": height 9.13, standoff -2.98, extent -44.47,-4.425 44.47,4.75